# Altium schematic symbol library LM5122MHNOPB.SchLib: 1 symbol
Pins are listed as number, name and electrical type; pins without a type are passive.

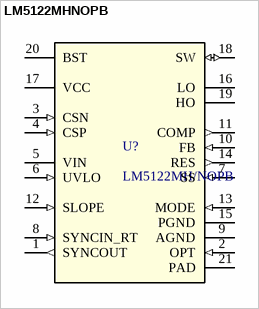
[diagram p0: symbol LM5122MHNOPB]

## LM5122MHNOPB
designator U?, comment LM5122MH/NOPB
3-65V Wide Vin, Current Mode Synchronous Boost Controller with Multiphase Capability 20-HTSSOP -40 to 125; Manufacturer_Name: Texas Instruments; CompType: IC; TYPE: TYPE; RefDes: RefDes; Copyright: Copyright (C) 2025 Ultra Librarian. All rights reserved.; Manufacturer_Part_Number: LM5122MH/NOPB; Application_BuildNumber: *; PartNumber: LM5122MH/NOPB; PackageReference: PWP0020A; MountType: SMT; RoHS: Y; Manufacturer: Texas Instruments
footprint PWP0020A_N
pins: 1 SYNCOUT (out), 2 OPT (in), 3 CSN (in), 4 CSP (in), 5 VIN (power), 6 UVLO (in), 7 SS (in), 8 SYNCIN_RT (in), 9 AGND (power), 10 FB (in), 11 COMP (out), 12 SLOPE (in), 13 MODE (in), 14 RES (out), 15 PGND (power), 16 LO (power), 17 VCC (power), 18 SW (io), 19 HO (power), 20 BST (power), 21 PAD (power)